# Altium integrated library ABM10-16.000MHZ-D30-T3.IntLib: 1 symbol
Pins are listed as number, name and electrical type; pins without a type are passive.

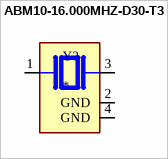
[diagram p0: symbol ABM10-16.000MHZ-D30-T3]

## ABM10-16.000MHZ-D30-T3
designator Y?
CERAMIC SMD ULTRA MINIATURE QUARTZ CRYSTAL; MP: ABM10-16.000MHZ-D30-T3; MF: Abracon; Package: SMD-4 Abracon; Availability: In Stock; Price: None; Check_prices: https://www.snapeda.com/parts/ABM10-16.000MHZ-D30-T3/Abracon+LLC/view-part/?ref=eda; Purchase-URL: https://pricing.snapeda.com/search/part/ABM10-16.000MHZ-D30-T3/?ref=eda; Value: *; SnapEDA_Link: https://www.snapeda.com/parts/ABM10-16.000MHZ-D30-T3/Abracon+LLC/view-part/?ref=snap
footprint XTAL_ABM10-16.000MHZ-D30-T3
pins: 1, 2 GND (power), 3 2, 4 GND (power)